# Altium footprint library PCB_Lib.PcbLib: 38 footprints (part 3 of 3)
Each footprint in its own frame and in the unit in brackets; x right, y up, seen from the top. Pads: shape width x height; smd on the part's side, far side on the other; paste and mask are expansions set on the pad; w line width, h text height; cw(c..) or ccw(c..) is an arc to the next point about the centre after c.
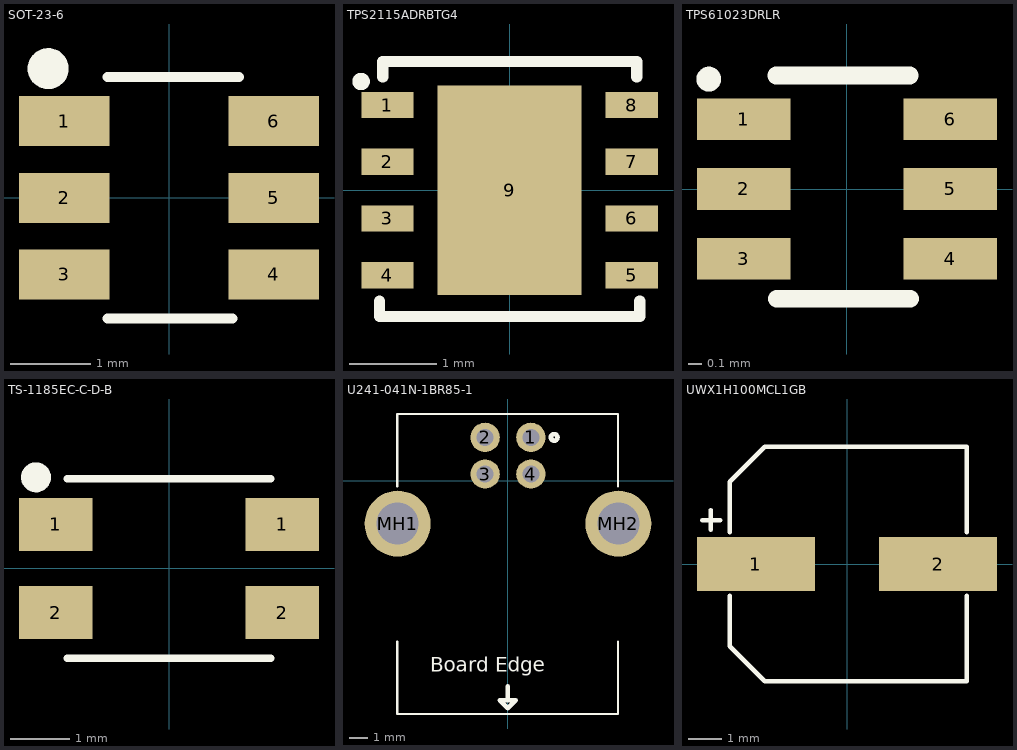
[diagram p2: the footprints below, top view; thin cyan lines are the x and y axes]

## SOT-23-6 [mm] "IC BAT CHG LI-ION 1 CELL SOT23-6"
pads (6):
  rect 1.12x0.62 smd: 1(-1.3,0.95) 2(-1.3,0) 3(-1.3,-0.95) 4(1.3,-0.95) 5(1.3,0) 6(1.3,0.95)
Top Overlay:
  circle w0.254: c-1.499,1.6 r0.127
  lines w0.127: -0.762,-1.499 0.787,-1.499 ; -0.762,1.499 0.864,1.499
3D body "User Library-SOT23-6-2.step": height 1.44, standoff -0.01, extent -1.4,-1.45 1.4,1.45

## TPS2115ADRBTG4 [mm] "IC OR CTRLR SRC SELECT 8SON"
pads (9):
  rect 0.6x0.3 smd: 1(-1.4,0.975) 2(-1.4,0.325) 3(-1.4,-0.325) 4(-1.4,-0.975) 5(1.4,-0.975) 6(1.4,-0.325) 7(1.4,0.325) 8(1.4,0.975)
  rect 1.65x2.4 smd: 9(0,0)
Top Overlay:
  circle w0.127: c-1.702,1.245 r0.036
  lines w0.127: -1.49,-1.27 -1.49,-1.448 1.49,-1.448 1.49,-1.27 ; -1.454,1.295 -1.454,1.473 1.457,1.473 1.457,1.295
3D body "TPS2115ADRBTG4.STEP": height 1, standoff 0, extent -1.5,-1.5 1.5,1.5

## TPS61023DRLR [mm] "Boost Switching Regulator IC 2.2V 1 Output 3A SOT-563, SOT-666"
pads (6):
  rect 0.67x0.3 smd: 1(-0.74,0.5) 2(-0.74,0) 3(-0.74,-0.5) 4(0.74,-0.5) 5(0.74,0) 6(0.74,0.5)
Top Overlay:
  circle w0.127: c-0.991,0.787 r0.025
  lines w0.127: -0.508,0.813 0.449,0.813 ; -0.504,-0.787 0.453,-0.787
3D body "TPS61023DRLR.STEP": height 0.6, standoff 0, extent -0.8,-0.8 0.8,0.8

## TS-1185EC-C-D-B [mm]
pads (4):
  rect 1.25x0.9 smd: 1(-1.925,0.75) 1(1.925,0.75) 2(-1.925,-0.75) 2(1.925,-0.75)
Top Overlay:
  circle w0.254: c-2.261,1.549 r0.127
  lines w0.127: -1.727,-1.524 1.727,-1.524 ; -1.727,1.524 1.727,1.524
3D body "ts-1185ec-c-d-b.stp": height 2, standoff 0, extent -2.325,-1.5 2.325,1.5

## U241-041N-1BR85-1 [mm] "USB - Type B 4 USB 2.0 Female Through Hole"
pads (6):
  round 1.6 hole 0.92: 1(1.25,2.355) 2(-1.25,2.355) 3(-1.25,0.355) 4(1.25,0.355)
  round 3.6 hole 2.3: MH1(-6.025,-2.355) MH2(6.025,-2.355)
Top Overlay:
  circle w0.254: c2.52,2.355 r0.18
  lines w0.127: -6.045,-8.788 -6.045,-12.751 6.005,-12.751 6.005,-8.788 ; -6.045,-0.33 -6.045,3.632 6.005,3.632 6.005,-0.33
  lines w0.254: -0.013,-11.239 -0.013,-12.002 ; 0.394,-12.027 -0.013,-12.433 -0.445,-12.002 -0.013,-12.002 ; 0.419,-12.002 -0.013,-12.002
  text "Board Edge" at -4.242,-10.452 h0.8
3D body "U241-041N-1BR85-1.stp": height 11.2, standoff -5, extent -7.067,-12.755 7.075,3.545

## UWX1H100MCL1GB [mm]
pads (2):
  rect 3.5x1.6 smd: 1(-2.7,0) 2(2.7,0)
Top Overlay:
  lines w0.127: -4.293,1.295 -3.759,1.295 ; -4.039,1.016 -4.039,1.6 ; -3.48,-0.94 -3.48,-2.438 -2.438,-3.48 3.556,-3.48 3.556,-0.94 ; -3.48,0.94 -3.48,2.438 -2.438,3.48 3.556,3.48 3.556,0.94
3D body "PCAP_6_3x5_4-ELECT_NCA.step": height 5.57, standoff 0, extent -3.696,-3.404 3.696,3.404